# Altium footprint library chipfc_libs.PCBLIB: 315 footprints (part 5 of 20)
Each footprint in its own frame and in the unit in brackets; x right, y up, seen from the top. Pads: shape width x height; smd on the part's side, far side on the other; paste and mask are expansions set on the pad; w line width, h text height; cw(c..) or ccw(c..) is an arc to the next point about the centre after c.
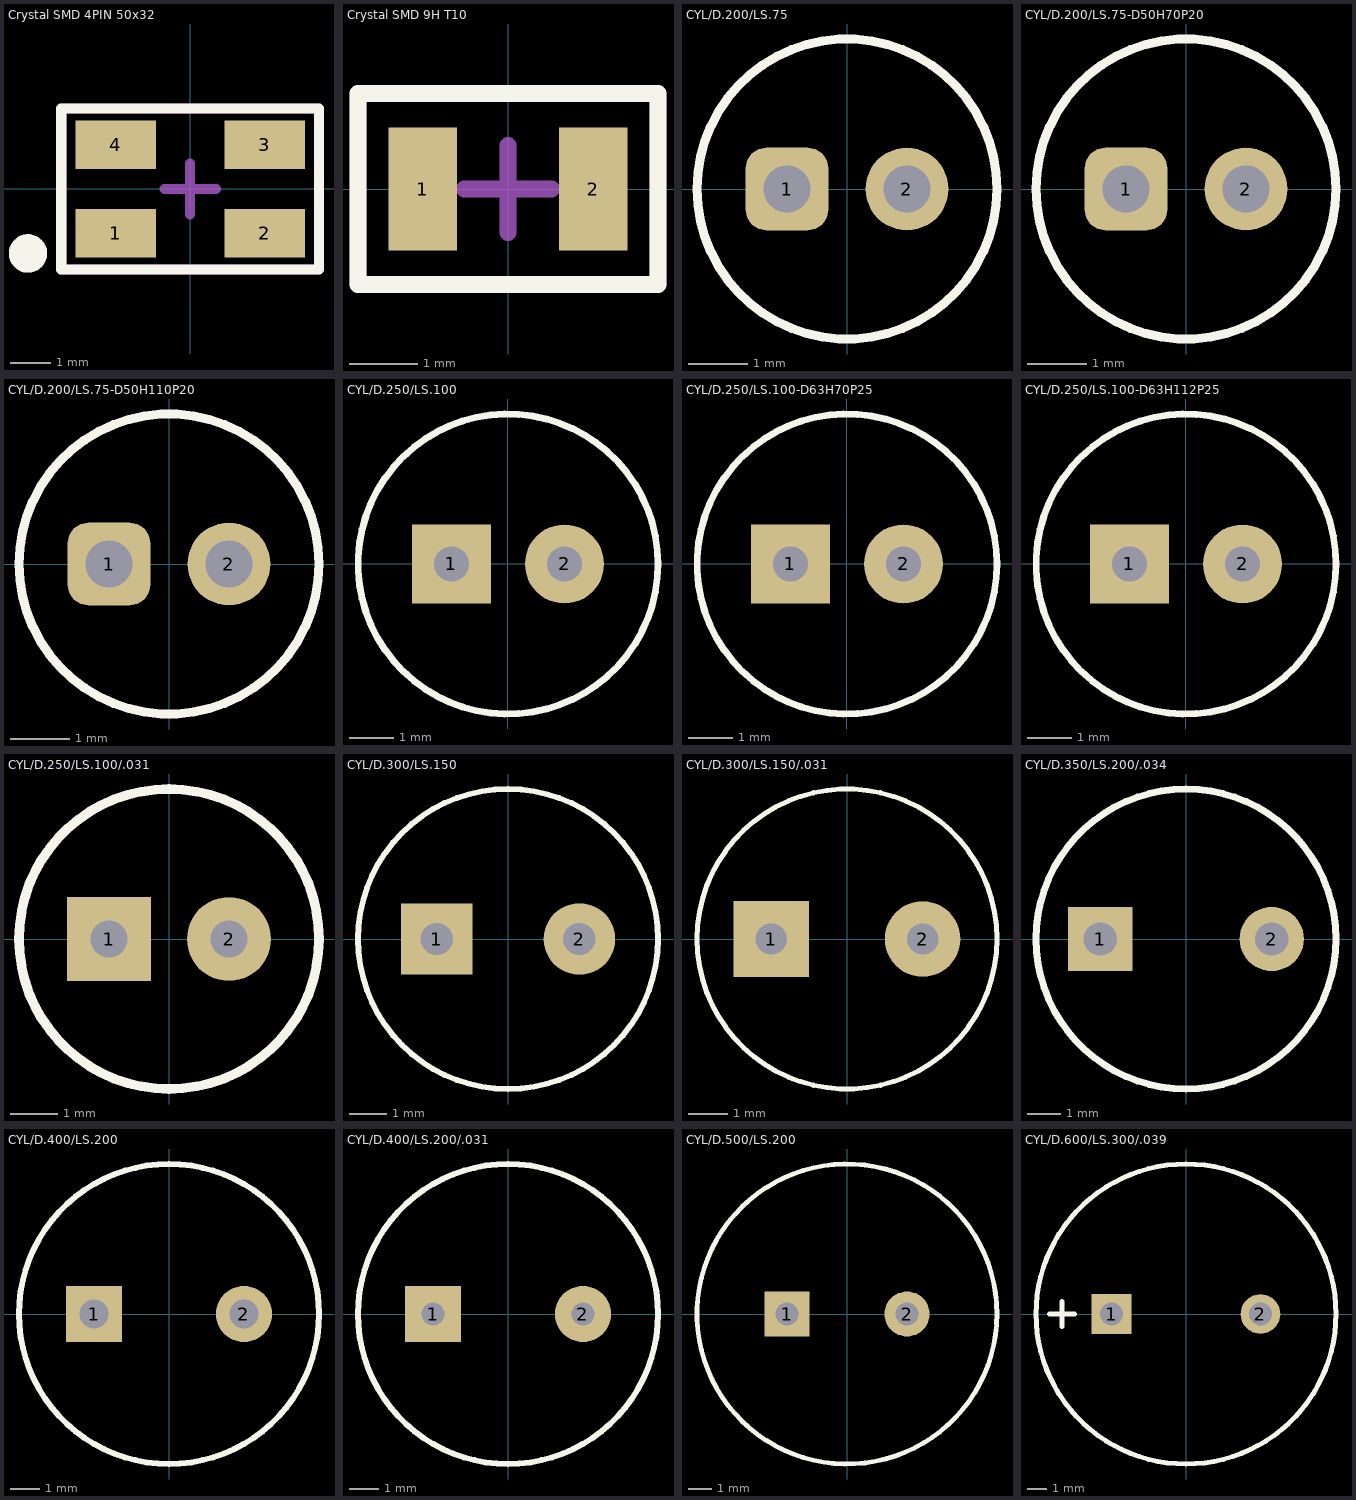
[diagram p4: the footprints below, top view; thin cyan lines are the x and y axes]

## Crystal SMD 4PIN 50x32 [mm]
pads (4):
  rect 2x1.2 smd: 1(-1.85,-1.1) 2(1.85,-1.1) 3(1.85,1.1) 4(-1.85,1.1)
Top Overlay:
  circle w0.508: c-4.024,-1.6 r0.224
  lines w0.254: -3.2,-2 -3.2,2 3.2,2 3.2,-2 -3.2,-2
Mechanical 15:
  lines w0.254: -0.635,0 0.635,0 ; 0,-0.635 0,0.635 ; -3.2,-2 -3.2,2 3.2,2 3.2,-2 -3.2,-2
3D body "User Library-Crystal.step": height 0.9, standoff -0.05, extent -2.5,-1.6 2.5,1.6

## Crystal SMD 9H T10 [mm] "TXC's SMD kHz crystal 9H T10 Series"
height 0.75
pads (2):
  rect 1x1.8 smd: 1(-1.25,0) 2(1.25,0)
Top Overlay:
  lines w0.254: -2.2,-1.4 2.2,-1.4 2.2,1.4 -2.2,1.4 -2.2,-1.4
Mechanical 15:
  lines w0.254: -0.635,0 0.635,0 ; 0,-0.635 0,0.635 ; -2.2,-1.4 2.2,-1.4 2.2,1.4 -2.2,1.4 -2.2,-1.4

## CYL/D.200/LS.75 [mm]
pads (2):
  rrect50% 1.4x1.4 hole 0.8: 1(-1.016,0)
  round 1.4 hole 0.8: 2(1.016,0)
Top Overlay:
  circle w0.152: c0,0 r2.54
3D body "CircuitWorks-ELECTROLITIC CAPACITOR RADIAL 5X11.step": height 11, standoff -2.5, extent -2.5,-2.5 2.5,2.5

## CYL/D.200/LS.75-D50H70P20 [mm]
pads (2):
  rrect50% 1.4x1.4 hole 0.8: 1(-1.016,0)
  round 1.4 hole 0.8: 2(1.016,0)
Top Overlay:
  circle w0.152: c0,0 r2.54
3D body "CapAluRadial_D50H70P20.step": height 7, standoff -3, extent -2.5,-2.5 2.501,2.5

## CYL/D.200/LS.75-D50H110P20 [mm]
pads (2):
  rrect50% 1.4x1.4 hole 0.8: 1(-1.016,0)
  round 1.4 hole 0.8: 2(1.016,0)
Top Overlay:
  circle w0.152: c0,0 r2.54
3D body "CapAluRadial_D50H110P20.step": height 11, standoff -3, extent -2.5,-2.5 2.501,2.5

## CYL/D.250/LS.100 [mil]
pads (2):
  rect 70x70 hole 31: 1(-50,0)
  round 70 hole 31: 2(50,0)
Top Overlay:
  circle w6: c0,0 r132.72
3D body "User Library-CapAluRadial_D63H110.STEP": height 492.13, standoff -118.11, extent -133.86,-133.45 132.72,133.45

## CYL/D.250/LS.100-D63H70P25 [mil]
pads (2):
  rect 70x70 hole 31: 1(-50,0)
  round 70 hole 31: 2(50,0)
Top Overlay:
  circle w6: c0,0 r132.72
3D body "CapAluRadial_D63H70P25.step": height 275.63, standoff -118.11, extent -124.02,-124.01 124.05,124.01

## CYL/D.250/LS.100-D63H112P25 [mil]
pads (2):
  rect 70x70 hole 31: 1(-50,0)
  round 70 hole 31: 2(50,0)
Top Overlay:
  circle w6: c0,0 r132.72
3D body "CapAluRadial_D63H112P25.step": height 440.98, standoff -118.11, extent -124.02,-124.01 124.05,124.01

## CYL/D.250/LS.100/.031 [mil]
pads (2):
  rect 70x70 hole 31: 1(-50,0)
  round 70 hole 31: 2(50,0)
Top Overlay:
  lines w8: -125,0 cw(c0,0) 0,125 cw(c0,0) 125,0 cw(c0,0) 0,-125 cw(c0,0) -125,0

## CYL/D.300/LS.150 [mil]
pads (2):
  rect 75x75 hole 34: 1(-75,0)
  round 75 hole 34: 2(75,0)
Top Overlay:
  circle w6: c0,0 r157.49
3D body "CircuitWorks-ELECTROLITIC CAPACITOR RADIAL 8X12.step": height 472.44, standoff -98.43, extent -157.48,-157.48 157.49,157.49

## CYL/D.300/LS.150/.031 [mil]
pads (2):
  rect 75x75 hole 31: 1(-75,0)
  round 75 / inner round 60 / far side round 75 hole 31: 2(75,0)
Top Overlay:
  circle w5: c0,0 r148.66

## CYL/D.350/LS.200/.034 [mil]
pads (2):
  rect 75x75 hole 39: 1(-100,0)
  round 75 hole 39: 2(100,0)
Top Overlay:
  lines w8: -175,0 cw(c0,0) 0,175 cw(c0,0) 175,0 cw(c0,0) 0,-175 cw(c0,0) -175,0

## CYL/D.400/LS.200 [mil]
pads (2):
  rect 75x75 hole 39: 1(-100,0)
  round 75 hole 39: 2(100,0)
Top Overlay:
  lines w8: -200,0 ccw(c0,0) 0,-200 ccw(c0,0) 200,0 ccw(c0,0) 0,200 ccw(c0,0) -200,0
3D body "User Library-CE_R200_D400_H500.step": height 500, standoff -106.3, extent -198.38,-199.3 200,199.32

## CYL/D.400/LS.200/.031 [mil]
pads (2):
  rect 75x75 / inner round 60 / far side rect 75x75 hole 31: 1(-100,0)
  round 75 / inner round 60 / far side round 75 hole 31: 2(100,0)
Top Overlay:
  lines w8: -200,0 ccw(c0,0) 0,-200 ccw(c0,0) 200,0 ccw(c0,0) 0,200 ccw(c0,0) -200,0

## CYL/D.500/LS.200 [mil]
pads (2):
  rect 75x75 hole 39: 1(-100,0)
  round 75 hole 39: 2(100,0)
Top Overlay:
  circle w8: c0,0 r250
3D body "User Library-CapAluRadial_D125H200.STEP": height 866.14, standoff -118.11, extent -255.9,-255.12 253.72,255.12

## CYL/D.600/LS.300/.039 [mil]
pads (2):
  rect 80x80 hole 47.24: 1(-150,0)
  round 80 hole 47.24: 2(150,0)
Top Overlay:
  circle w10: c0,0 r302.08
  lines w10: -275,0 -225,0 ; -250,-25 -250,25